# Altium schematic symbol library Altium_Library.SchLib: 822 symbols (part 6 of 17)
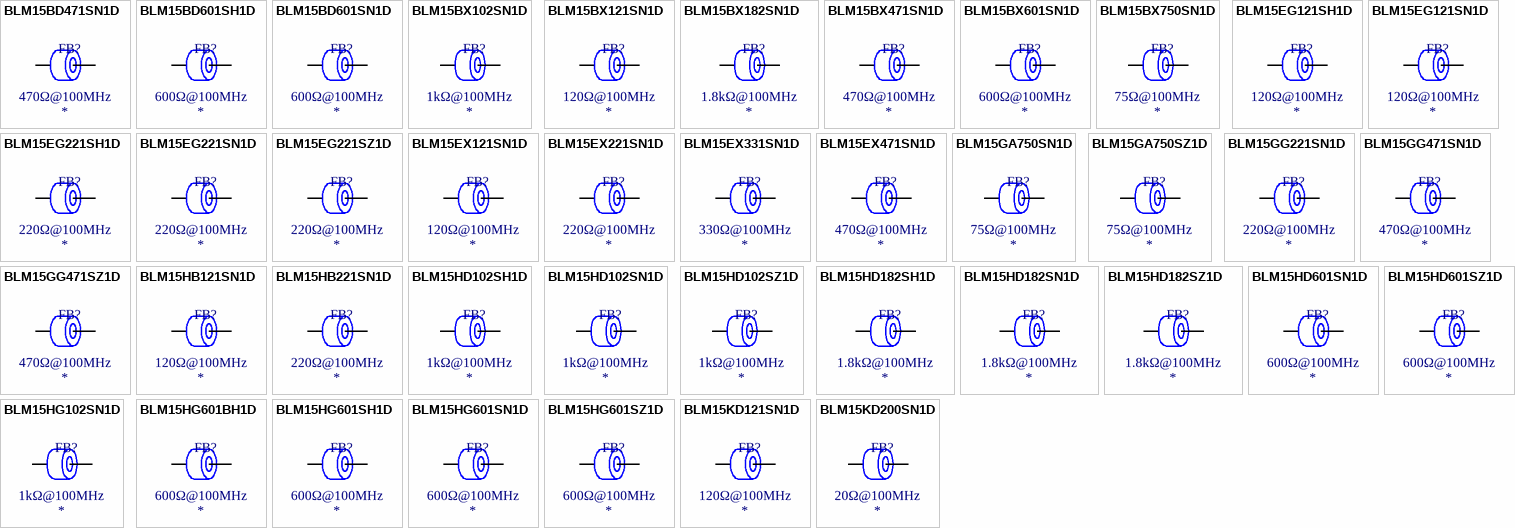
[diagram p25: symbols BLM15BD471SN1D to BLM15KD200SN1D]

## BLM15BX750SN1D
designator FB?  Impedance @ Frequency: 75Ω@100MHz
Ferrite, 75Ω@100MHz, ±25%, 150mΩ, 600mA, SMD 0402; Manufacturer: Murata Electronics; Manufacturer Part Number: BLM15BX750SN1D; Package Size: 0402; JLCPCB Basic Part: No; JLCPCB Part Number: C269770; Supplier 1: LCSC; Category: Ferrite Beads; Supplier Part Number 1: C269770; Tolerance: ±25%; Rated Current: 600mA; DC Resistance: 150mΩ; RoHS: Yes; ComponentLink1Description: Datasheet; ComponentLink1URL: https://wmsc.lcsc.com/wmsc/upload/file/pdf/v2/lcsc/2304140030_Murata-Electronics-BLM15BX750SN1D_C269770.pdf; ComponentLink2Description: JLCPCB Part URL; ComponentLink2URL: https://jlcpcb.com/partdetail/C269770; ComponentLink3Description: LCSC Part URL; ComponentLink3URL: https://lcsc.com/product-detail/Ferrite-Beads_Murata-Electronics-Murata-Electronics-BLM15BX750SN1D_C269770.html
footprint FB-0402 (0402 (1005M) Ferrite)
pins: 1, 2

## BLM15EG121SH1D
designator FB?  Impedance @ Frequency: 120Ω@100MHz
Ferrite, 120Ω@100MHz, ±25%, 95mΩ, 1.5A, SMD 0402; Manufacturer: Murata Electronics; Manufacturer Part Number: BLM15EG121SH1D; Package Size: 0402; JLCPCB Basic Part: No; JLCPCB Part Number: C2661817; Supplier 1: LCSC; Category: Ferrite Beads; Supplier Part Number 1: C2661817; Tolerance: ±25%; Rated Current: 1.5A; DC Resistance: 95mΩ; RoHS: Yes; ComponentLink1Description: Datasheet; ComponentLink1URL: https://wmsc.lcsc.com/wmsc/upload/file/pdf/v2/lcsc/2304140030_Murata-Electronics-BLM15EG121SH1D_C2661817.pdf; ComponentLink2Description: JLCPCB Part URL; ComponentLink2URL: https://jlcpcb.com/partdetail/C2661817; ComponentLink3Description: LCSC Part URL; ComponentLink3URL: https://lcsc.com/product-detail/Ferrite-Beads_Murata-Electronics-Murata-Electronics-BLM15EG121SH1D_C2661817.html
footprint FB-0402 (0402 (1005M) Ferrite)
pins: 1, 2

## BLM15EG121SN1D
designator FB?  Impedance @ Frequency: 120Ω@100MHz
Ferrite, 120Ω@100MHz, ±25%, 95mΩ, 1.5A, SMD 0402; Manufacturer: Murata Electronics; Manufacturer Part Number: BLM15EG121SN1D; Package Size: 0402; JLCPCB Basic Part: No; JLCPCB Part Number: C82861; Supplier 1: LCSC; Category: Ferrite Beads; Supplier Part Number 1: C82861; Tolerance: ±25%; Rated Current: 1.5A; DC Resistance: 95mΩ; RoHS: Yes; ComponentLink1Description: Datasheet; ComponentLink1URL: https://wmsc.lcsc.com/wmsc/upload/file/pdf/v2/lcsc/2304140030_Murata-Electronics-BLM15EG121SN1D_C82861.pdf; ComponentLink2Description: JLCPCB Part URL; ComponentLink2URL: https://jlcpcb.com/partdetail/C82861; ComponentLink3Description: LCSC Part URL; ComponentLink3URL: https://lcsc.com/product-detail/Ferrite-Beads_Murata-Electronics-Murata-Electronics-BLM15EG121SN1D_C82861.html
footprint FB-0402 (0402 (1005M) Ferrite)
pins: 1, 2

## BLM15EG221SH1D
designator FB?  Impedance @ Frequency: 220Ω@100MHz
Ferrite, 220Ω@100MHz, ±25%, 280mΩ, 700mA, SMD 0402; Manufacturer: Murata Electronics; Manufacturer Part Number: BLM15EG221SH1D; Package Size: 0402; JLCPCB Basic Part: No; JLCPCB Part Number: C2662025; Supplier 1: LCSC; Category: Ferrite Beads; Supplier Part Number 1: C2662025; Tolerance: ±25%; Rated Current: 700mA; DC Resistance: 280mΩ; RoHS: Yes; ComponentLink1Description: Datasheet; ComponentLink1URL: https://wmsc.lcsc.com/wmsc/upload/file/pdf/v2/lcsc/2108070930_Murata-Electronics-BLM15EG221SH1D_C2662025.pdf; ComponentLink2Description: JLCPCB Part URL; ComponentLink2URL: https://jlcpcb.com/partdetail/C2662025; ComponentLink3Description: LCSC Part URL; ComponentLink3URL: https://lcsc.com/product-detail/Ferrite-Beads_Murata-Electronics-Murata-Electronics-BLM15EG221SH1D_C2662025.html
footprint FB-0402 (0402 (1005M) Ferrite)
pins: 1, 2

## BLM15EG221SN1D
designator FB?  Impedance @ Frequency: 220Ω@100MHz
Ferrite, 220Ω@100MHz, ±25%, 280mΩ, 700mA, SMD 0402; Manufacturer: Murata Electronics; Manufacturer Part Number: BLM15EG221SN1D; Package Size: 0402; JLCPCB Basic Part: No; JLCPCB Part Number: C85821; Supplier 1: LCSC; Category: Ferrite Beads; Supplier Part Number 1: C85821; Tolerance: ±25%; Rated Current: 700mA; DC Resistance: 280mΩ; RoHS: Yes; ComponentLink1Description: Datasheet; ComponentLink1URL: https://wmsc.lcsc.com/wmsc/upload/file/pdf/v2/lcsc/2304140030_Murata-Electronics-BLM15EG221SN1D_C85821.pdf; ComponentLink2Description: JLCPCB Part URL; ComponentLink2URL: https://jlcpcb.com/partdetail/C85821; ComponentLink3Description: LCSC Part URL; ComponentLink3URL: https://lcsc.com/product-detail/Ferrite-Beads_Murata-Electronics-Murata-Electronics-BLM15EG221SN1D_C85821.html
footprint FB-0402 (0402 (1005M) Ferrite)
pins: 1, 2

## BLM15EG221SZ1D
designator FB?  Impedance @ Frequency: 220Ω@100MHz
Ferrite, 220Ω@100MHz, ±25%, 280mΩ, 700mA, SMD 0402; Manufacturer: Murata Electronics; Manufacturer Part Number: BLM15EG221SZ1D; Package Size: 0402; JLCPCB Basic Part: No; JLCPCB Part Number: C710338; Supplier 1: LCSC; Category: Ferrite Beads; Supplier Part Number 1: C710338; Tolerance: ±25%; Rated Current: 700mA; DC Resistance: 280mΩ; RoHS: Yes; ComponentLink1Description: Datasheet; ComponentLink1URL: https://wmsc.lcsc.com/wmsc/upload/file/pdf/v2/lcsc/2012231244_Murata-Electronics-BLM15EG221SZ1D_C710338.pdf; ComponentLink2Description: JLCPCB Part URL; ComponentLink2URL: https://jlcpcb.com/partdetail/C710338; ComponentLink3Description: LCSC Part URL; ComponentLink3URL: https://lcsc.com/product-detail/Ferrite-Beads_Murata-Electronics-Murata-Electronics-BLM15EG221SZ1D_C710338.html
footprint FB-0402 (0402 (1005M) Ferrite)
pins: 1, 2

## BLM15EX121SN1D
designator FB?  Impedance @ Frequency: 120Ω@100MHz
Ferrite, 120Ω@100MHz, ±25%, 75mΩ, 1.8A, SMD 0402; Manufacturer: Murata Electronics; Manufacturer Part Number: BLM15EX121SN1D; Package Size: 0402; JLCPCB Basic Part: No; JLCPCB Part Number: C426325; Supplier 1: LCSC; Category: Ferrite Beads; Supplier Part Number 1: C426325; Tolerance: ±25%; Rated Current: 1.8A; DC Resistance: 75mΩ; RoHS: Yes; ComponentLink1Description: Datasheet; ComponentLink1URL: https://wmsc.lcsc.com/wmsc/upload/file/pdf/v2/lcsc/2304140030_Murata-Electronics-BLM15EX121SN1D_C426325.pdf; ComponentLink2Description: JLCPCB Part URL; ComponentLink2URL: https://jlcpcb.com/partdetail/C426325; ComponentLink3Description: LCSC Part URL; ComponentLink3URL: https://lcsc.com/product-detail/Ferrite-Beads_Murata-Electronics-Murata-Electronics-BLM15EX121SN1D_C426325.html
footprint FB-0402 (0402 (1005M) Ferrite)
pins: 1, 2

## BLM15EX221SN1D
designator FB?  Impedance @ Frequency: 220Ω@100MHz
Ferrite, 220Ω@100MHz, ±25%, 140mΩ, 1.3A, SMD 0402; Manufacturer: Murata Electronics; Manufacturer Part Number: BLM15EX221SN1D; Package Size: 0402; JLCPCB Basic Part: No; JLCPCB Part Number: C527619; Supplier 1: LCSC; Category: Ferrite Beads; Supplier Part Number 1: C527619; Tolerance: ±25%; Rated Current: 1.3A; DC Resistance: 140mΩ; RoHS: Yes; ComponentLink1Description: Datasheet; ComponentLink1URL: https://wmsc.lcsc.com/wmsc/upload/file/pdf/v2/lcsc/2007231033_Murata-Electronics-BLM15EX221SN1D_C527619.pdf; ComponentLink2Description: JLCPCB Part URL; ComponentLink2URL: https://jlcpcb.com/partdetail/C527619; ComponentLink3Description: LCSC Part URL; ComponentLink3URL: https://lcsc.com/product-detail/Ferrite-Beads_Murata-Electronics-Murata-Electronics-BLM15EX221SN1D_C527619.html
footprint FB-0402 (0402 (1005M) Ferrite)
pins: 1, 2

## BLM15EX331SN1D
designator FB?  Impedance @ Frequency: 330Ω@100MHz
Ferrite, 330Ω@100MHz, 205mΩ, SMD 0402; Manufacturer: Murata Electronics; Manufacturer Part Number: BLM15EX331SN1D; Package Size: 0402; JLCPCB Basic Part: No; JLCPCB Part Number: C596498; Supplier 1: LCSC; Category: Ferrite Beads; Supplier Part Number 1: C596498; DC Resistance: 205mΩ; RoHS: Yes; ComponentLink1Description: Datasheet; ComponentLink1URL: https://wmsc.lcsc.com/wmsc/upload/file/pdf/v2/lcsc/2308111547_Murata-Electronics-BLM15EX331SN1D_C596498.pdf; ComponentLink2Description: JLCPCB Part URL; ComponentLink2URL: https://jlcpcb.com/partdetail/C596498; ComponentLink3Description: LCSC Part URL; ComponentLink3URL: https://lcsc.com/product-detail/Ferrite-Beads_Murata-Electronics-Murata-Electronics-BLM15EX331SN1D_C596498.html
footprint FB-0402 (0402 (1005M) Ferrite)
pins: 1, 2

## BLM15EX471SN1D
designator FB?  Impedance @ Frequency: 470Ω@100MHz
Ferrite, 470Ω@100MHz, ±25%, 280mΩ, 950mA, SMD 0402; Manufacturer: Murata Electronics; Manufacturer Part Number: BLM15EX471SN1D; Package Size: 0402; JLCPCB Basic Part: No; JLCPCB Part Number: C160971; Supplier 1: LCSC; Category: Ferrite Beads; Supplier Part Number 1: C160971; Tolerance: ±25%; Rated Current: 950mA; DC Resistance: 280mΩ; RoHS: Yes; ComponentLink1Description: Datasheet; ComponentLink1URL: https://wmsc.lcsc.com/wmsc/upload/file/pdf/v2/lcsc/1811081543_Murata-Electronics-BLM15EX471SN1D_C160971.pdf; ComponentLink2Description: JLCPCB Part URL; ComponentLink2URL: https://jlcpcb.com/partdetail/C160971; ComponentLink3Description: LCSC Part URL; ComponentLink3URL: https://lcsc.com/product-detail/Ferrite-Beads_Murata-Electronics-Murata-Electronics-BLM15EX471SN1D_C160971.html
footprint FB-0402 (0402 (1005M) Ferrite)
pins: 1, 2

## BLM15GA750SN1D
designator FB?  Impedance @ Frequency: 75Ω@100MHz
Ferrite, 75Ω@100MHz, ±25%, 1.3Ω, 200mA, SMD 0402; Manufacturer: Murata Electronics; Manufacturer Part Number: BLM15GA750SN1D; Package Size: 0402; JLCPCB Basic Part: No; JLCPCB Part Number: C113009; Supplier 1: LCSC; Category: Ferrite Beads; Supplier Part Number 1: C113009; Tolerance: ±25%; Rated Current: 200mA; DC Resistance: 1.3Ω; RoHS: Yes; ComponentLink1Description: Datasheet; ComponentLink1URL: https://wmsc.lcsc.com/wmsc/upload/file/pdf/v2/lcsc/1811081516_Murata-Electronics-BLM15GA750SN1D_C113009.pdf; ComponentLink2Description: JLCPCB Part URL; ComponentLink2URL: https://jlcpcb.com/partdetail/C113009; ComponentLink3Description: LCSC Part URL; ComponentLink3URL: https://lcsc.com/product-detail/Ferrite-Beads_Murata-Electronics-Murata-Electronics-BLM15GA750SN1D_C113009.html
footprint FB-0402 (0402 (1005M) Ferrite)
pins: 1, 2

## BLM15GA750SZ1D
designator FB?  Impedance @ Frequency: 75Ω@100MHz
Ferrite, 75Ω@100MHz, ±25%, 1.3Ω, 200mA, SMD 0402; Manufacturer: Murata Electronics; Manufacturer Part Number: BLM15GA750SZ1D; Package Size: 0402; JLCPCB Basic Part: No; JLCPCB Part Number: C2661966; Supplier 1: LCSC; Category: Ferrite Beads; Supplier Part Number 1: C2661966; Tolerance: ±25%; Rated Current: 200mA; DC Resistance: 1.3Ω; RoHS: Yes; ComponentLink1Description: Datasheet; ComponentLink1URL: https://wmsc.lcsc.com/wmsc/upload/file/pdf/v2/lcsc/2106071735_Murata-Electronics-BLM15GA750SZ1D_C2661966.pdf; ComponentLink2Description: JLCPCB Part URL; ComponentLink2URL: https://jlcpcb.com/partdetail/C2661966; ComponentLink3Description: LCSC Part URL; ComponentLink3URL: https://lcsc.com/product-detail/Ferrite-Beads_Murata-Electronics-Murata-Electronics-BLM15GA750SZ1D_C2661966.html
footprint FB-0402 (0402 (1005M) Ferrite)
pins: 1, 2

## BLM15GG221SN1D
designator FB?  Impedance @ Frequency: 220Ω@100MHz
Ferrite, 220Ω@100MHz, ±25%, 700mΩ, 300mA, SMD 0402; Manufacturer: Murata Electronics; Manufacturer Part Number: BLM15GG221SN1D; Package Size: 0402; JLCPCB Basic Part: No; JLCPCB Part Number: C167448; Supplier 1: LCSC; Category: Ferrite Beads; Supplier Part Number 1: C167448; Tolerance: ±25%; Rated Current: 300mA; DC Resistance: 700mΩ; RoHS: Yes; ComponentLink1Description: Datasheet; ComponentLink1URL: https://wmsc.lcsc.com/wmsc/upload/file/pdf/v2/lcsc/1811081543_Murata-Electronics-BLM15GG221SN1D_C167448.pdf; ComponentLink2Description: JLCPCB Part URL; ComponentLink2URL: https://jlcpcb.com/partdetail/C167448; ComponentLink3Description: LCSC Part URL; ComponentLink3URL: https://lcsc.com/product-detail/Ferrite-Beads_Murata-Electronics-Murata-Electronics-BLM15GG221SN1D_C167448.html
footprint FB-0402 (0402 (1005M) Ferrite)
pins: 1, 2

## BLM15GG471SN1D
designator FB?  Impedance @ Frequency: 470Ω@100MHz
Ferrite, 470Ω@100MHz, ±25%, 1.3Ω, 200mA, SMD 0402; Manufacturer: Murata Electronics; Manufacturer Part Number: BLM15GG471SN1D; Package Size: 0402; JLCPCB Basic Part: No; JLCPCB Part Number: C88964; Supplier 1: LCSC; Category: Ferrite Beads; Supplier Part Number 1: C88964; Tolerance: ±25%; Rated Current: 200mA; DC Resistance: 1.3Ω; RoHS: Yes; ComponentLink1Description: Datasheet; ComponentLink1URL: https://wmsc.lcsc.com/wmsc/upload/file/pdf/v2/lcsc/2304140030_Murata-Electronics-BLM15GG471SN1D_C88964.pdf; ComponentLink2Description: JLCPCB Part URL; ComponentLink2URL: https://jlcpcb.com/partdetail/C88964; ComponentLink3Description: LCSC Part URL; ComponentLink3URL: https://lcsc.com/product-detail/Ferrite-Beads_Murata-Electronics-Murata-Electronics-BLM15GG471SN1D_C88964.html
footprint FB-0402 (0402 (1005M) Ferrite)
pins: 1, 2

## BLM15GG471SZ1D
designator FB?  Impedance @ Frequency: 470Ω@100MHz
Ferrite, 470Ω@100MHz, ±25%, 1.3Ω, 200mA, SMD 0402; Manufacturer: Murata Electronics; Manufacturer Part Number: BLM15GG471SZ1D; Package Size: 0402; JLCPCB Basic Part: No; JLCPCB Part Number: C710339; Supplier 1: LCSC; Category: Ferrite Beads; Supplier Part Number 1: C710339; Tolerance: ±25%; Rated Current: 200mA; DC Resistance: 1.3Ω; RoHS: Yes; ComponentLink1Description: Datasheet; ComponentLink1URL: https://wmsc.lcsc.com/wmsc/upload/file/pdf/v2/lcsc/2304140030_Murata-Electronics-BLM15GG471SZ1D_C710339.pdf; ComponentLink2Description: JLCPCB Part URL; ComponentLink2URL: https://jlcpcb.com/partdetail/C710339; ComponentLink3Description: LCSC Part URL; ComponentLink3URL: https://lcsc.com/product-detail/Ferrite-Beads_Murata-Electronics-Murata-Electronics-BLM15GG471SZ1D_C710339.html
footprint FB-0402 (0402 (1005M) Ferrite)
pins: 1, 2

## BLM15HB121SN1D
designator FB?  Impedance @ Frequency: 120Ω@100MHz
Ferrite, 120Ω@100MHz, ±25%, 700mΩ, 300mA, SMD 0402; Manufacturer: Murata Electronics; Manufacturer Part Number: BLM15HB121SN1D; Package Size: 0402; JLCPCB Basic Part: No; JLCPCB Part Number: C88965; Supplier 1: LCSC; Category: Ferrite Beads; Supplier Part Number 1: C88965; Tolerance: ±25%; Rated Current: 300mA; DC Resistance: 700mΩ; RoHS: Yes; ComponentLink1Description: Datasheet; ComponentLink1URL: https://wmsc.lcsc.com/wmsc/upload/file/pdf/v2/lcsc/2304140030_Murata-Electronics-BLM15HB121SN1D_C88965.pdf; ComponentLink2Description: JLCPCB Part URL; ComponentLink2URL: https://jlcpcb.com/partdetail/C88965; ComponentLink3Description: LCSC Part URL; ComponentLink3URL: https://lcsc.com/product-detail/Ferrite-Beads_Murata-Electronics-Murata-Electronics-BLM15HB121SN1D_C88965.html
footprint FB-0402 (0402 (1005M) Ferrite)
pins: 1, 2

## BLM15HB221SN1D
designator FB?  Impedance @ Frequency: 220Ω@100MHz
Ferrite, 220Ω@100MHz, ±25%, 1Ω, 250mA, SMD 0402; Manufacturer: Murata Electronics; Manufacturer Part Number: BLM15HB221SN1D; Package Size: 0402; JLCPCB Basic Part: No; JLCPCB Part Number: C88966; Supplier 1: LCSC; Category: Ferrite Beads; Supplier Part Number 1: C88966; Tolerance: ±25%; Rated Current: 250mA; DC Resistance: 1Ω; RoHS: Yes; ComponentLink1Description: Datasheet; ComponentLink1URL: https://wmsc.lcsc.com/wmsc/upload/file/pdf/v2/lcsc/2304140030_Murata-Electronics-BLM15HB221SN1D_C88966.pdf; ComponentLink2Description: JLCPCB Part URL; ComponentLink2URL: https://jlcpcb.com/partdetail/C88966; ComponentLink3Description: LCSC Part URL; ComponentLink3URL: https://lcsc.com/product-detail/Ferrite-Beads_Murata-Electronics-Murata-Electronics-BLM15HB221SN1D_C88966.html
footprint FB-0402 (0402 (1005M) Ferrite)
pins: 1, 2

## BLM15HD102SH1D
designator FB?  Impedance @ Frequency: 1kΩ@100MHz
Ferrite, 1kΩ@100MHz, ±25%, 1.25Ω, 250mA, SMD 0402; Manufacturer: Murata Electronics; Manufacturer Part Number: BLM15HD102SH1D; Package Size: 0402; JLCPCB Basic Part: No; JLCPCB Part Number: C440128; Supplier 1: LCSC; Category: Ferrite Beads; Supplier Part Number 1: C440128; Tolerance: ±25%; Rated Current: 250mA; DC Resistance: 1.25Ω; RoHS: Yes; ComponentLink1Description: Datasheet; ComponentLink1URL: https://wmsc.lcsc.com/wmsc/upload/file/pdf/v2/lcsc/2001071206_Murata-Electronics-BLM15HD102SH1D_C440128.pdf; ComponentLink2Description: JLCPCB Part URL; ComponentLink2URL: https://jlcpcb.com/partdetail/C440128; ComponentLink3Description: LCSC Part URL; ComponentLink3URL: https://lcsc.com/product-detail/Ferrite-Beads_Murata-Electronics-Murata-Electronics-BLM15HD102SH1D_C440128.html
footprint FB-0402 (0402 (1005M) Ferrite)
pins: 1, 2

## BLM15HD102SN1D
designator FB?  Impedance @ Frequency: 1kΩ@100MHz
Ferrite, 1kΩ@100MHz, ±25%, 1.25Ω, 250mA, SMD 0402; Manufacturer: Murata Electronics; Manufacturer Part Number: BLM15HD102SN1D; Package Size: 0402; JLCPCB Basic Part: No; JLCPCB Part Number: C21516; Supplier 1: LCSC; Category: Ferrite Beads; Supplier Part Number 1: C21516; Tolerance: ±25%; Rated Current: 250mA; DC Resistance: 1.25Ω; RoHS: Yes; ComponentLink1Description: Datasheet; ComponentLink1URL: https://wmsc.lcsc.com/wmsc/upload/file/pdf/v2/lcsc/1811091923_Murata-Electronics-BLM15HD102SN1D_C21516.pdf; ComponentLink2Description: JLCPCB Part URL; ComponentLink2URL: https://jlcpcb.com/partdetail/C21516; ComponentLink3Description: LCSC Part URL; ComponentLink3URL: https://lcsc.com/product-detail/Ferrite-Beads_Murata-Electronics-Murata-Electronics-BLM15HD102SN1D_C21516.html
footprint FB-0402 (0402 (1005M) Ferrite)
pins: 1, 2

## BLM15HD102SZ1D
designator FB?  Impedance @ Frequency: 1kΩ@100MHz
Ferrite, 1kΩ@100MHz, 1.25Ω, SMD 0402; Manufacturer: Murata Electronics; Manufacturer Part Number: BLM15HD102SZ1D; Package Size: 0402; JLCPCB Basic Part: No; JLCPCB Part Number: C783274; Supplier 1: LCSC; Category: Ferrite Beads; Supplier Part Number 1: C783274; DC Resistance: 1.25Ω; RoHS: Yes; ComponentLink1Description: Datasheet; ComponentLink1URL: https://wmsc.lcsc.com/wmsc/upload/file/pdf/v2/lcsc/2308111547_Murata-Electronics-BLM15HD102SZ1D_C783274.pdf; ComponentLink2Description: JLCPCB Part URL; ComponentLink2URL: https://jlcpcb.com/partdetail/C783274; ComponentLink3Description: LCSC Part URL; ComponentLink3URL: https://lcsc.com/product-detail/Ferrite-Beads_Murata-Electronics-Murata-Electronics-BLM15HD102SZ1D_C783274.html
footprint FB-0402 (0402 (1005M) Ferrite)
pins: 1, 2

## BLM15HD182SH1D
designator FB?  Impedance @ Frequency: 1.8kΩ@100MHz
Ferrite, 1.8kΩ@100MHz, ±25%, 2.2Ω, 200mA, SMD 0402; Manufacturer: Murata Electronics; Manufacturer Part Number: BLM15HD182SH1D; Package Size: 0402; JLCPCB Basic Part: No; JLCPCB Part Number: C337876; Supplier 1: LCSC; Category: Ferrite Beads; Supplier Part Number 1: C337876; Tolerance: ±25%; Rated Current: 200mA; DC Resistance: 2.2Ω; RoHS: Yes; ComponentLink1Description: Datasheet; ComponentLink1URL: https://wmsc.lcsc.com/wmsc/upload/file/pdf/v2/lcsc/2304140030_Murata-Electronics-BLM15HD182SH1D_C337876.pdf; ComponentLink2Description: JLCPCB Part URL; ComponentLink2URL: https://jlcpcb.com/partdetail/C337876; ComponentLink3Description: LCSC Part URL; ComponentLink3URL: https://lcsc.com/product-detail/Ferrite-Beads_Murata-Electronics-Murata-Electronics-BLM15HD182SH1D_C337876.html
footprint FB-0402 (0402 (1005M) Ferrite)
pins: 1, 2

## BLM15HD182SN1D
designator FB?  Impedance @ Frequency: 1.8kΩ@100MHz
Ferrite, 1.8kΩ@100MHz, ±25%, 2.2Ω, 200mA, SMD 0402; Manufacturer: Murata Electronics; Manufacturer Part Number: BLM15HD182SN1D; Package Size: 0402; JLCPCB Basic Part: No; JLCPCB Part Number: C76888; Supplier 1: LCSC; Category: Ferrite Beads; Supplier Part Number 1: C76888; Tolerance: ±25%; Rated Current: 200mA; DC Resistance: 2.2Ω; RoHS: Yes; ComponentLink1Description: Datasheet; ComponentLink1URL: https://wmsc.lcsc.com/wmsc/upload/file/pdf/v2/lcsc/2304140030_Murata-Electronics-BLM15HD182SN1D_C76888.pdf; ComponentLink2Description: JLCPCB Part URL; ComponentLink2URL: https://jlcpcb.com/partdetail/C76888; ComponentLink3Description: LCSC Part URL; ComponentLink3URL: https://lcsc.com/product-detail/Ferrite-Beads_Murata-Electronics-Murata-Electronics-BLM15HD182SN1D_C76888.html
footprint FB-0402 (0402 (1005M) Ferrite)
pins: 1, 2

## BLM15HD182SZ1D
designator FB?  Impedance @ Frequency: 1.8kΩ@100MHz
Ferrite, 1.8kΩ@100MHz, ±25%, 2.2Ω, 200mA, SMD 0402; Manufacturer: Murata Electronics; Manufacturer Part Number: BLM15HD182SZ1D; Package Size: 0402; JLCPCB Basic Part: No; JLCPCB Part Number: C2661581; Supplier 1: LCSC; Category: Ferrite Beads; Supplier Part Number 1: C2661581; Tolerance: ±25%; Rated Current: 200mA; DC Resistance: 2.2Ω; RoHS: Yes; ComponentLink1Description: Datasheet; ComponentLink1URL: https://wmsc.lcsc.com/wmsc/upload/file/pdf/v2/lcsc/2202131730_Murata-Electronics-BLM15HD182SZ1D_C2661581.pdf; ComponentLink2Description: JLCPCB Part URL; ComponentLink2URL: https://jlcpcb.com/partdetail/C2661581; ComponentLink3Description: LCSC Part URL; ComponentLink3URL: https://lcsc.com/product-detail/Ferrite-Beads_Murata-Electronics-Murata-Electronics-BLM15HD182SZ1D_C2661581.html
footprint FB-0402 (0402 (1005M) Ferrite)
pins: 1, 2

## BLM15HD601SN1D
designator FB?  Impedance @ Frequency: 600Ω@100MHz
Ferrite, 600Ω@100MHz, ±25%, 850mΩ, 300mA, SMD 0402; Manufacturer: Murata Electronics; Manufacturer Part Number: BLM15HD601SN1D; Package Size: 0402; JLCPCB Basic Part: No; JLCPCB Part Number: C88967; Supplier 1: LCSC; Category: Ferrite Beads; Supplier Part Number 1: C88967; Tolerance: ±25%; Rated Current: 300mA; DC Resistance: 850mΩ; RoHS: Yes; ComponentLink1Description: Datasheet; ComponentLink1URL: https://wmsc.lcsc.com/wmsc/upload/file/pdf/v2/lcsc/2304140030_Murata-Electronics-BLM15HD601SN1D_C88967.pdf; ComponentLink2Description: JLCPCB Part URL; ComponentLink2URL: https://jlcpcb.com/partdetail/C88967; ComponentLink3Description: LCSC Part URL; ComponentLink3URL: https://lcsc.com/product-detail/Ferrite-Beads_Murata-Electronics-Murata-Electronics-BLM15HD601SN1D_C88967.html
footprint FB-0402 (0402 (1005M) Ferrite)
pins: 1, 2

## BLM15HD601SZ1D
designator FB?  Impedance @ Frequency: 600Ω@100MHz
Ferrite, 600Ω@100MHz, ±25%, 850mΩ, 300mA, SMD 0402; Manufacturer: Murata Electronics; Manufacturer Part Number: BLM15HD601SZ1D; Package Size: 0402; JLCPCB Basic Part: No; JLCPCB Part Number: C710340; Supplier 1: LCSC; Category: Ferrite Beads; Supplier Part Number 1: C710340; Tolerance: ±25%; Rated Current: 300mA; DC Resistance: 850mΩ; RoHS: Yes; ComponentLink1Description: Datasheet; ComponentLink1URL: https://wmsc.lcsc.com/wmsc/upload/file/pdf/v2/lcsc/2201131100_Murata-Electronics-BLM15HD601SZ1D_C710340.pdf; ComponentLink2Description: JLCPCB Part URL; ComponentLink2URL: https://jlcpcb.com/partdetail/C710340; ComponentLink3Description: LCSC Part URL; ComponentLink3URL: https://lcsc.com/product-detail/Ferrite-Beads_Murata-Electronics-Murata-Electronics-BLM15HD601SZ1D_C710340.html
footprint FB-0402 (0402 (1005M) Ferrite)
pins: 1, 2

## BLM15HG102SN1D
designator FB?  Impedance @ Frequency: 1kΩ@100MHz
Ferrite, 1kΩ@100MHz, ±25%, 1.1Ω, 250mA, SMD 0402; Manufacturer: Murata Electronics; Manufacturer Part Number: BLM15HG102SN1D; Package Size: 0402; JLCPCB Basic Part: No; JLCPCB Part Number: C76889; Supplier 1: LCSC; Category: Ferrite Beads; Supplier Part Number 1: C76889; Tolerance: ±25%; Rated Current: 250mA; DC Resistance: 1.1Ω; RoHS: Yes; ComponentLink1Description: Datasheet; ComponentLink1URL: https://wmsc.lcsc.com/wmsc/upload/file/pdf/v2/lcsc/2304140030_Murata-Electronics-BLM15HG102SN1D_C76889.pdf; ComponentLink2Description: JLCPCB Part URL; ComponentLink2URL: https://jlcpcb.com/partdetail/C76889; ComponentLink3Description: LCSC Part URL; ComponentLink3URL: https://lcsc.com/product-detail/Ferrite-Beads_Murata-Electronics-Murata-Electronics-BLM15HG102SN1D_C76889.html
footprint FB-0402 (0402 (1005M) Ferrite)
pins: 1, 2

## BLM15HG601BH1D
designator FB?  Impedance @ Frequency: 600Ω@100MHz
Ferrite, 600Ω@100MHz, ±25%, 700mΩ, 300mA, SMD 0402; Manufacturer: Murata Electronics; Manufacturer Part Number: BLM15HG601BH1D; Package Size: 0402; JLCPCB Basic Part: No; JLCPCB Part Number: C710342; Supplier 1: LCSC; Category: Ferrite Beads; Supplier Part Number 1: C710342; Tolerance: ±25%; Rated Current: 300mA; DC Resistance: 700mΩ; RoHS: Yes; ComponentLink1Description: Datasheet; ComponentLink1URL: https://wmsc.lcsc.com/wmsc/upload/file/pdf/v2/lcsc/2201131100_Murata-Electronics-BLM15HG601BH1D_C710342.pdf; ComponentLink2Description: JLCPCB Part URL; ComponentLink2URL: https://jlcpcb.com/partdetail/C710342; ComponentLink3Description: LCSC Part URL; ComponentLink3URL: https://lcsc.com/product-detail/Ferrite-Beads_Murata-Electronics-Murata-Electronics-BLM15HG601BH1D_C710342.html
footprint FB-0402 (0402 (1005M) Ferrite)
pins: 1, 2

## BLM15HG601SH1D
designator FB?  Impedance @ Frequency: 600Ω@100MHz
Ferrite, 600Ω@100MHz, ±25%, 700mΩ, 300mA, SMD 0402; Manufacturer: Murata Electronics; Manufacturer Part Number: BLM15HG601SH1D; Package Size: 0402; JLCPCB Basic Part: No; JLCPCB Part Number: C2661959; Supplier 1: LCSC; Category: Ferrite Beads; Supplier Part Number 1: C2661959; Tolerance: ±25%; Rated Current: 300mA; DC Resistance: 700mΩ; RoHS: Yes; ComponentLink1Description: Datasheet; ComponentLink1URL: https://wmsc.lcsc.com/wmsc/upload/file/pdf/v2/lcsc/2106071735_Murata-Electronics-BLM15HG601SH1D_C2661959.pdf; ComponentLink2Description: JLCPCB Part URL; ComponentLink2URL: https://jlcpcb.com/partdetail/C2661959; ComponentLink3Description: LCSC Part URL; ComponentLink3URL: https://lcsc.com/product-detail/Ferrite-Beads_Murata-Electronics-Murata-Electronics-BLM15HG601SH1D_C2661959.html
footprint FB-0402 (0402 (1005M) Ferrite)
pins: 1, 2

## BLM15HG601SN1D
designator FB?  Impedance @ Frequency: 600Ω@100MHz
Ferrite, 600Ω@100MHz, ±25%, 700mΩ, 300mA, SMD 0402; Manufacturer: Murata Electronics; Manufacturer Part Number: BLM15HG601SN1D; Package Size: 0402; JLCPCB Basic Part: No; JLCPCB Part Number: C76890; Supplier 1: LCSC; Category: Ferrite Beads; Supplier Part Number 1: C76890; Tolerance: ±25%; Rated Current: 300mA; DC Resistance: 700mΩ; RoHS: Yes; ComponentLink1Description: Datasheet; ComponentLink1URL: https://wmsc.lcsc.com/wmsc/upload/file/pdf/v2/lcsc/2304140030_Murata-Electronics-BLM15HG601SN1D_C76890.pdf; ComponentLink2Description: JLCPCB Part URL; ComponentLink2URL: https://jlcpcb.com/partdetail/C76890; ComponentLink3Description: LCSC Part URL; ComponentLink3URL: https://lcsc.com/product-detail/Ferrite-Beads_Murata-Electronics-Murata-Electronics-BLM15HG601SN1D_C76890.html
footprint FB-0402 (0402 (1005M) Ferrite)
pins: 1, 2

## BLM15HG601SZ1D
designator FB?  Impedance @ Frequency: 600Ω@100MHz
Ferrite, 600Ω@100MHz, 700mΩ, SMD 0402; Manufacturer: Murata Electronics; Manufacturer Part Number: BLM15HG601SZ1D; Package Size: 0402; JLCPCB Basic Part: No; JLCPCB Part Number: C723884; Supplier 1: LCSC; Category: Ferrite Beads; Supplier Part Number 1: C723884; DC Resistance: 700mΩ; RoHS: Yes; ComponentLink1Description: Datasheet; ComponentLink1URL: https://wmsc.lcsc.com/wmsc/upload/file/pdf/v2/lcsc/2304140030_Murata-Electronics-BLM15HG601SZ1D_C723884.pdf; ComponentLink2Description: JLCPCB Part URL; ComponentLink2URL: https://jlcpcb.com/partdetail/C723884; ComponentLink3Description: LCSC Part URL; ComponentLink3URL: https://lcsc.com/product-detail/Ferrite-Beads_Murata-Electronics-Murata-Electronics-BLM15HG601SZ1D_C723884.html
footprint FB-0402 (0402 (1005M) Ferrite)
pins: 1, 2

## BLM15KD121SN1D
designator FB?  Impedance @ Frequency: 120Ω@100MHz
Ferrite, 120Ω@100MHz, ±25%, 70mΩ, 1.5A, SMD 0402; Manufacturer: Murata Electronics; Manufacturer Part Number: BLM15KD121SN1D; Package Size: 0402; JLCPCB Basic Part: No; JLCPCB Part Number: C710343; Supplier 1: LCSC; Category: Ferrite Beads; Supplier Part Number 1: C710343; Tolerance: ±25%; Rated Current: 1.5A; DC Resistance: 70mΩ; RoHS: Yes; ComponentLink1Description: Datasheet; ComponentLink1URL: https://wmsc.lcsc.com/wmsc/upload/file/pdf/v2/lcsc/2304140030_Murata-Electronics-BLM15KD121SN1D_C710343.pdf; ComponentLink2Description: JLCPCB Part URL; ComponentLink2URL: https://jlcpcb.com/partdetail/C710343; ComponentLink3Description: LCSC Part URL; ComponentLink3URL: https://lcsc.com/product-detail/Ferrite-Beads_Murata-Electronics-Murata-Electronics-BLM15KD121SN1D_C710343.html
footprint FB-0402 (0402 (1005M) Ferrite)
pins: 1, 2

## BLM15KD200SN1D
designator FB?  Impedance @ Frequency: 20Ω@100MHz
Ferrite, 20Ω@100MHz, ±25%, 11mΩ, 3.8A, SMD 0402; Manufacturer: Murata Electronics; Manufacturer Part Number: BLM15KD200SN1D; Package Size: 0402; JLCPCB Basic Part: No; JLCPCB Part Number: C701260; Supplier 1: LCSC; Category: Ferrite Beads; Supplier Part Number 1: C701260; Tolerance: ±25%; Rated Current: 3.8A; DC Resistance: 11mΩ; RoHS: Yes; ComponentLink1Description: Datasheet; ComponentLink1URL: https://wmsc.lcsc.com/wmsc/upload/file/pdf/v2/lcsc/2304140030_Murata-Electronics-BLM15KD200SN1D_C701260.pdf; ComponentLink2Description: JLCPCB Part URL; ComponentLink2URL: https://jlcpcb.com/partdetail/C701260; ComponentLink3Description: LCSC Part URL; ComponentLink3URL: https://lcsc.com/product-detail/Ferrite-Beads_Murata-Electronics-Murata-Electronics-BLM15KD200SN1D_C701260.html
footprint FB-0402 (0402 (1005M) Ferrite)
pins: 1, 2

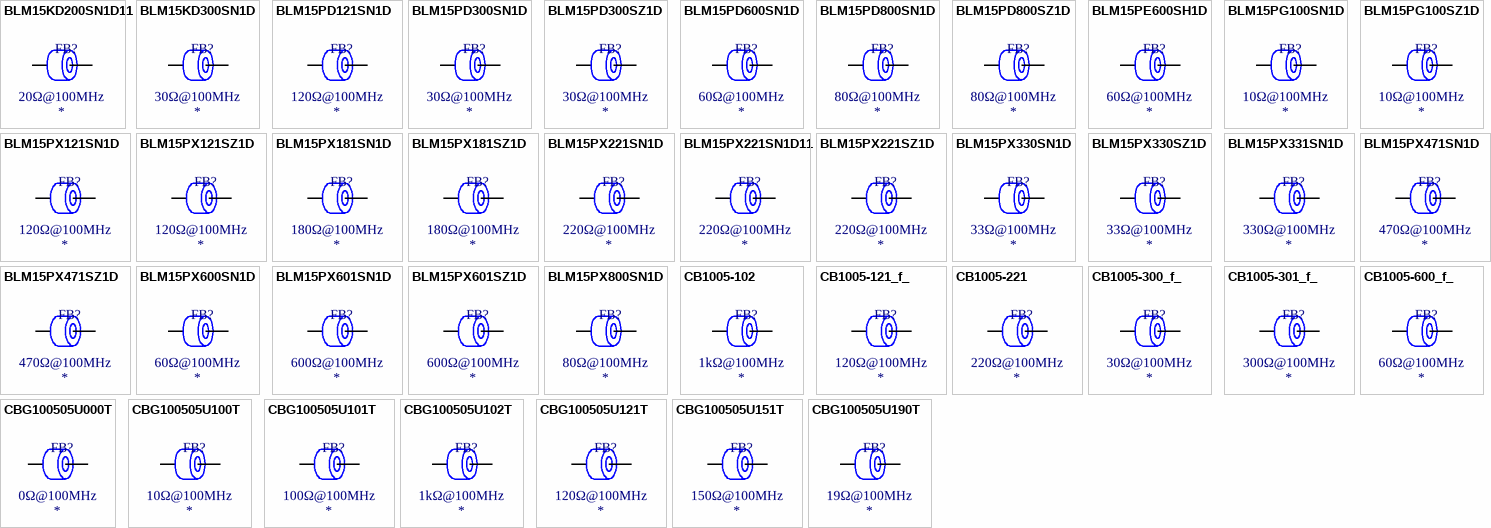
[diagram p8: symbols BLM15KD200SN1D11 to CBG100505U190T]

## BLM15KD200SN1D11
designator FB?  Impedance @ Frequency: 20Ω@100MHz
Ferrite, 20Ω@100MHz, ±25%, 11mΩ, 3.8A, SMD 0402; Manufacturer: Murata Electronics; Manufacturer Part Number: BLM15KD200SN1D11; Package Size: 0402; JLCPCB Basic Part: No; JLCPCB Part Number: C560062; Supplier 1: LCSC; Category: Ferrite Beads; Supplier Part Number 1: C560062; Tolerance: ±25%; Rated Current: 3.8A; DC Resistance: 11mΩ; RoHS: Yes; ComponentLink1Description: Datasheet; ComponentLink1URL: https://wmsc.lcsc.com/wmsc/upload/file/pdf/v2/lcsc/2304140030_Murata-Electronics-BLM15KD200SN1D11_C560062.pdf; ComponentLink2Description: JLCPCB Part URL; ComponentLink2URL: https://jlcpcb.com/partdetail/C560062; ComponentLink3Description: LCSC Part URL; ComponentLink3URL: https://lcsc.com/product-detail/Ferrite-Beads_Murata-Electronics-Murata-Electronics-BLM15KD200SN1D11_C560062.html
footprint FB-0402 (0402 (1005M) Ferrite)
pins: 1, 2

## BLM15KD300SN1D
designator FB?  Impedance @ Frequency: 30Ω@100MHz
Ferrite, 30Ω@100MHz, ±25%, 17mΩ, 3.1A, SMD 0402; Manufacturer: Murata Electronics; Manufacturer Part Number: BLM15KD300SN1D; Package Size: 0402; JLCPCB Basic Part: No; JLCPCB Part Number: C710344; Supplier 1: LCSC; Category: Ferrite Beads; Supplier Part Number 1: C710344; Tolerance: ±25%; Rated Current: 3.1A; DC Resistance: 17mΩ; RoHS: Yes; ComponentLink1Description: Datasheet; ComponentLink1URL: https://wmsc.lcsc.com/wmsc/upload/file/pdf/v2/lcsc/2304140030_Murata-Electronics-BLM15KD300SN1D_C710344.pdf; ComponentLink2Description: JLCPCB Part URL; ComponentLink2URL: https://jlcpcb.com/partdetail/C710344; ComponentLink3Description: LCSC Part URL; ComponentLink3URL: https://lcsc.com/product-detail/Ferrite-Beads_Murata-Electronics-Murata-Electronics-BLM15KD300SN1D_C710344.html
footprint FB-0402 (0402 (1005M) Ferrite)
pins: 1, 2

## BLM15PD121SN1D
designator FB?  Impedance @ Frequency: 120Ω@100MHz
Ferrite, 120Ω@100MHz, ±25%, 90mΩ, 1.3A, SMD 0402; Manufacturer: Murata Electronics; Manufacturer Part Number: BLM15PD121SN1D; Package Size: 0402; JLCPCB Basic Part: No; JLCPCB Part Number: C76891; Supplier 1: LCSC; Category: Ferrite Beads; Supplier Part Number 1: C76891; Tolerance: ±25%; Rated Current: 1.3A; DC Resistance: 90mΩ; RoHS: Yes; ComponentLink1Description: Datasheet; ComponentLink1URL: https://wmsc.lcsc.com/wmsc/upload/file/pdf/v2/lcsc/2304140030_Murata-Electronics-BLM15PD121SN1D_C76891.pdf; ComponentLink2Description: JLCPCB Part URL; ComponentLink2URL: https://jlcpcb.com/partdetail/C76891; ComponentLink3Description: LCSC Part URL; ComponentLink3URL: https://lcsc.com/product-detail/Ferrite-Beads_Murata-Electronics-Murata-Electronics-BLM15PD121SN1D_C76891.html
footprint FB-0402 (0402 (1005M) Ferrite)
pins: 1, 2

## BLM15PD300SN1D
designator FB?  Impedance @ Frequency: 30Ω@100MHz
Ferrite, 30Ω@100MHz, ±25%, 35mΩ, 2.2A, SMD 0402; Manufacturer: Murata Electronics; Manufacturer Part Number: BLM15PD300SN1D; Package Size: 0402; JLCPCB Basic Part: No; JLCPCB Part Number: C85822; Supplier 1: LCSC; Category: Ferrite Beads; Supplier Part Number 1: C85822; Tolerance: ±25%; Rated Current: 2.2A; DC Resistance: 35mΩ; RoHS: Yes; ComponentLink1Description: Datasheet; ComponentLink1URL: https://wmsc.lcsc.com/wmsc/upload/file/pdf/v2/lcsc/2304140030_Murata-Electronics-BLM15PD300SN1D_C85822.pdf; ComponentLink2Description: JLCPCB Part URL; ComponentLink2URL: https://jlcpcb.com/partdetail/C85822; ComponentLink3Description: LCSC Part URL; ComponentLink3URL: https://lcsc.com/product-detail/Ferrite-Beads_Murata-Electronics-Murata-Electronics-BLM15PD300SN1D_C85822.html
footprint FB-0402 (0402 (1005M) Ferrite)
pins: 1, 2

## BLM15PD300SZ1D
designator FB?  Impedance @ Frequency: 30Ω@100MHz
Ferrite, 30Ω@100MHz, ±25%, 35mΩ, 2.2A, SMD 0402; Manufacturer: Murata Electronics; Manufacturer Part Number: BLM15PD300SZ1D; Package Size: 0402; JLCPCB Basic Part: No; JLCPCB Part Number: C882960; Supplier 1: LCSC; Category: Ferrite Beads; Supplier Part Number 1: C882960; Tolerance: ±25%; Rated Current: 2.2A; DC Resistance: 35mΩ; RoHS: Yes; ComponentLink1Description: Datasheet; ComponentLink1URL: https://wmsc.lcsc.com/wmsc/upload/file/pdf/v2/lcsc/2201242130_Murata-Electronics-BLM15PD300SZ1D_C882960.pdf; ComponentLink2Description: JLCPCB Part URL; ComponentLink2URL: https://jlcpcb.com/partdetail/C882960; ComponentLink3Description: LCSC Part URL; ComponentLink3URL: https://lcsc.com/product-detail/Ferrite-Beads_Murata-Electronics-Murata-Electronics-BLM15PD300SZ1D_C882960.html
footprint FB-0402 (0402 (1005M) Ferrite)
pins: 1, 2

## BLM15PD600SN1D
designator FB?  Impedance @ Frequency: 60Ω@100MHz
Ferrite, 60Ω@100MHz, ±25%, 60mΩ, 1.7A, SMD 0402; Manufacturer: Murata Electronics; Manufacturer Part Number: BLM15PD600SN1D; Package Size: 0402; JLCPCB Basic Part: No; JLCPCB Part Number: C88969; Supplier 1: LCSC; Category: Ferrite Beads; Supplier Part Number 1: C88969; Tolerance: ±25%; Rated Current: 1.7A; DC Resistance: 60mΩ; RoHS: Yes; ComponentLink1Description: Datasheet; ComponentLink1URL: https://wmsc.lcsc.com/wmsc/upload/file/pdf/v2/lcsc/2304140030_Murata-Electronics-BLM15PD600SN1D_C88969.pdf; ComponentLink2Description: JLCPCB Part URL; ComponentLink2URL: https://jlcpcb.com/partdetail/C88969; ComponentLink3Description: LCSC Part URL; ComponentLink3URL: https://lcsc.com/product-detail/Ferrite-Beads_Murata-Electronics-Murata-Electronics-BLM15PD600SN1D_C88969.html
footprint FB-0402 (0402 (1005M) Ferrite)
pins: 1, 2

## BLM15PD800SN1D
designator FB?  Impedance @ Frequency: 80Ω@100MHz
Ferrite, 80Ω@100MHz, ±25%, 70mΩ, 1.5A, SMD 0402; Manufacturer: Murata Electronics; Manufacturer Part Number: BLM15PD800SN1D; Package Size: 0402; JLCPCB Basic Part: No; JLCPCB Part Number: C237347; Supplier 1: LCSC; Category: Ferrite Beads; Supplier Part Number 1: C237347; Tolerance: ±25%; Rated Current: 1.5A; DC Resistance: 70mΩ; RoHS: Yes; ComponentLink1Description: Datasheet; ComponentLink1URL: https://wmsc.lcsc.com/wmsc/upload/file/pdf/v2/lcsc/2304140030_Murata-Electronics-BLM15PD800SN1D_C237347.pdf; ComponentLink2Description: JLCPCB Part URL; ComponentLink2URL: https://jlcpcb.com/partdetail/C237347; ComponentLink3Description: LCSC Part URL; ComponentLink3URL: https://lcsc.com/product-detail/Ferrite-Beads_Murata-Electronics-Murata-Electronics-BLM15PD800SN1D_C237347.html
footprint FB-0402 (0402 (1005M) Ferrite)
pins: 1, 2

## BLM15PD800SZ1D
designator FB?  Impedance @ Frequency: 80Ω@100MHz
Ferrite, 80Ω@100MHz, ±25%, 70mΩ, 1.5A, SMD 0402; Manufacturer: Murata Electronics; Manufacturer Part Number: BLM15PD800SZ1D; Package Size: 0402; JLCPCB Basic Part: No; JLCPCB Part Number: C160972; Supplier 1: LCSC; Category: Ferrite Beads; Supplier Part Number 1: C160972; Tolerance: ±25%; Rated Current: 1.5A; DC Resistance: 70mΩ; RoHS: Yes; ComponentLink1Description: Datasheet; ComponentLink1URL: https://wmsc.lcsc.com/wmsc/upload/file/pdf/v2/lcsc/1811081513_Murata-Electronics-BLM15PD800SZ1D_C160972.pdf; ComponentLink2Description: JLCPCB Part URL; ComponentLink2URL: https://jlcpcb.com/partdetail/C160972; ComponentLink3Description: LCSC Part URL; ComponentLink3URL: https://lcsc.com/product-detail/Ferrite-Beads_Murata-Electronics-Murata-Electronics-BLM15PD800SZ1D_C160972.html
footprint FB-0402 (0402 (1005M) Ferrite)
pins: 1, 2

## BLM15PE600SH1D
designator FB?  Impedance @ Frequency: 60Ω@100MHz
Ferrite, 60Ω@100MHz, 60mΩ, SMD 0402; Manufacturer: Murata Electronics; Manufacturer Part Number: BLM15PE600SH1D; Package Size: 0402; JLCPCB Basic Part: No; JLCPCB Part Number: C3716993; Supplier 1: LCSC; Category: Ferrite Beads; Supplier Part Number 1: C3716993; DC Resistance: 60mΩ; RoHS: Yes; ComponentLink1Description: Datasheet; ComponentLink1URL: https://wmsc.lcsc.com/wmsc/upload/file/pdf/v2/lcsc/2401161242_Murata-Electronics-BLM15PE600SH1D_C3716993.pdf; ComponentLink2Description: JLCPCB Part URL; ComponentLink2URL: https://jlcpcb.com/partdetail/C3716993; ComponentLink3Description: LCSC Part URL; ComponentLink3URL: https://lcsc.com/product-detail/Ferrite-Beads_Murata-Electronics-Murata-Electronics-BLM15PE600SH1D_C3716993.html
footprint FB-0402 (0402 (1005M) Ferrite)
pins: 1, 2

## BLM15PG100SN1D
designator FB?  Impedance @ Frequency: 10Ω@100MHz
Ferrite, 10Ω@100MHz, ±25%, 25mΩ, 1A, SMD 0402; Manufacturer: Murata Electronics; Manufacturer Part Number: BLM15PG100SN1D; Package Size: 0402; JLCPCB Basic Part: No; JLCPCB Part Number: C85823; Supplier 1: LCSC; Category: Ferrite Beads; Supplier Part Number 1: C85823; Tolerance: ±25%; Rated Current: 1A; DC Resistance: 25mΩ; RoHS: Yes; ComponentLink1Description: Datasheet; ComponentLink1URL: https://wmsc.lcsc.com/wmsc/upload/file/pdf/v2/lcsc/2304140030_Murata-Electronics-BLM15PG100SN1D_C85823.pdf; ComponentLink2Description: JLCPCB Part URL; ComponentLink2URL: https://jlcpcb.com/partdetail/C85823; ComponentLink3Description: LCSC Part URL; ComponentLink3URL: https://lcsc.com/product-detail/Ferrite-Beads_Murata-Electronics-Murata-Electronics-BLM15PG100SN1D_C85823.html
footprint FB-0402 (0402 (1005M) Ferrite)
pins: 1, 2

## BLM15PG100SZ1D
designator FB?  Impedance @ Frequency: 10Ω@100MHz
Ferrite, 10Ω@100MHz, ±25%, 250mΩ, 1A, SMD 0402; Manufacturer: Murata Electronics; Manufacturer Part Number: BLM15PG100SZ1D; Package Size: 0402; JLCPCB Basic Part: No; JLCPCB Part Number: C2661915; Supplier 1: LCSC; Category: Ferrite Beads; Supplier Part Number 1: C2661915; Tolerance: ±25%; Rated Current: 1A; DC Resistance: 250mΩ; RoHS: Yes; ComponentLink1Description: Datasheet; ComponentLink1URL: https://wmsc.lcsc.com/wmsc/upload/file/pdf/v2/lcsc/2304140030_Murata-Electronics-BLM15PG100SZ1D_C2661915.pdf; ComponentLink2Description: JLCPCB Part URL; ComponentLink2URL: https://jlcpcb.com/partdetail/C2661915; ComponentLink3Description: LCSC Part URL; ComponentLink3URL: https://lcsc.com/product-detail/Ferrite-Beads_Murata-Electronics-Murata-Electronics-BLM15PG100SZ1D_C2661915.html
footprint FB-0402 (0402 (1005M) Ferrite)
pins: 1, 2

## BLM15PX121SN1D
designator FB?  Impedance @ Frequency: 120Ω@100MHz
Ferrite, 120Ω@100MHz, ±25%, 55mΩ, 2A, SMD 0402; Manufacturer: Murata Electronics; Manufacturer Part Number: BLM15PX121SN1D; Package Size: 0402; JLCPCB Basic Part: No; JLCPCB Part Number: C88970; Supplier 1: LCSC; Category: Ferrite Beads; Supplier Part Number 1: C88970; Tolerance: ±25%; Rated Current: 2A; DC Resistance: 55mΩ; RoHS: Yes; ComponentLink1Description: Datasheet; ComponentLink1URL: https://wmsc.lcsc.com/wmsc/upload/file/pdf/v2/lcsc/2304140030_Murata-Electronics-BLM15PX121SN1D_C88970.pdf; ComponentLink2Description: JLCPCB Part URL; ComponentLink2URL: https://jlcpcb.com/partdetail/C88970; ComponentLink3Description: LCSC Part URL; ComponentLink3URL: https://lcsc.com/product-detail/Ferrite-Beads_Murata-Electronics-Murata-Electronics-BLM15PX121SN1D_C88970.html
footprint FB-0402 (0402 (1005M) Ferrite)
pins: 1, 2

## BLM15PX121SZ1D
designator FB?  Impedance @ Frequency: 120Ω@100MHz
Ferrite, 120Ω@100MHz, ±25%, 55mΩ, 2A, SMD 0402; Manufacturer: Murata Electronics; Manufacturer Part Number: BLM15PX121SZ1D; Package Size: 0402; JLCPCB Basic Part: No; JLCPCB Part Number: C701266; Supplier 1: LCSC; Category: Ferrite Beads; Supplier Part Number 1: C701266; Tolerance: ±25%; Rated Current: 2A; DC Resistance: 55mΩ; RoHS: Yes; ComponentLink1Description: Datasheet; ComponentLink1URL: https://wmsc.lcsc.com/wmsc/upload/file/pdf/v2/lcsc/2304140030_Murata-Electronics-BLM15PX121SZ1D_C701266.pdf; ComponentLink2Description: JLCPCB Part URL; ComponentLink2URL: https://jlcpcb.com/partdetail/C701266; ComponentLink3Description: LCSC Part URL; ComponentLink3URL: https://lcsc.com/product-detail/Ferrite-Beads_Murata-Electronics-Murata-Electronics-BLM15PX121SZ1D_C701266.html
footprint FB-0402 (0402 (1005M) Ferrite)
pins: 1, 2

## BLM15PX181SN1D
designator FB?  Impedance @ Frequency: 180Ω@100MHz
Ferrite, 180Ω@100MHz, ±25%, 90mΩ, 1.5A, SMD 0402; Manufacturer: Murata Electronics; Manufacturer Part Number: BLM15PX181SN1D; Package Size: 0402; JLCPCB Basic Part: No; JLCPCB Part Number: C237601; Supplier 1: LCSC; Category: Ferrite Beads; Supplier Part Number 1: C237601; Tolerance: ±25%; Rated Current: 1.5A; DC Resistance: 90mΩ; RoHS: Yes; ComponentLink1Description: Datasheet; ComponentLink1URL: https://wmsc.lcsc.com/wmsc/upload/file/pdf/v2/lcsc/2304140030_Murata-Electronics-BLM15PX181SN1D_C237601.pdf; ComponentLink2Description: JLCPCB Part URL; ComponentLink2URL: https://jlcpcb.com/partdetail/C237601; ComponentLink3Description: LCSC Part URL; ComponentLink3URL: https://lcsc.com/product-detail/Ferrite-Beads_Murata-Electronics-Murata-Electronics-BLM15PX181SN1D_C237601.html
footprint FB-0402 (0402 (1005M) Ferrite)
pins: 1, 2

## BLM15PX181SZ1D
designator FB?  Impedance @ Frequency: 180Ω@100MHz
Ferrite, 180Ω@100MHz, 90mΩ, 1.5A, SMD 0402; Manufacturer: Murata Electronics; Manufacturer Part Number: BLM15PX181SZ1D; Package Size: 0402; JLCPCB Basic Part: No; JLCPCB Part Number: C560034; Supplier 1: LCSC; Category: Ferrite Beads; Supplier Part Number 1: C560034; Rated Current: 1.5A; DC Resistance: 90mΩ; RoHS: Yes; ComponentLink1Description: Datasheet; ComponentLink1URL: https://wmsc.lcsc.com/wmsc/upload/file/pdf/v2/lcsc/2308111441_Murata-Electronics-BLM15PX181SZ1D_C560034.pdf; ComponentLink2Description: JLCPCB Part URL; ComponentLink2URL: https://jlcpcb.com/partdetail/C560034; ComponentLink3Description: LCSC Part URL; ComponentLink3URL: https://lcsc.com/product-detail/Ferrite-Beads_Murata-Electronics-Murata-Electronics-BLM15PX181SZ1D_C560034.html
footprint FB-0402 (0402 (1005M) Ferrite)
pins: 1, 2

## BLM15PX221SN1D
designator FB?  Impedance @ Frequency: 220Ω@100MHz
Ferrite, 220Ω@100MHz, ±25%, 100mΩ, 1.4A, SMD 0402; Manufacturer: Murata Electronics; Manufacturer Part Number: BLM15PX221SN1D; Package Size: 0402; JLCPCB Basic Part: No; JLCPCB Part Number: C160973; Supplier 1: LCSC; Category: Ferrite Beads; Supplier Part Number 1: C160973; Tolerance: ±25%; Rated Current: 1.4A; DC Resistance: 100mΩ; RoHS: Yes; ComponentLink1Description: Datasheet; ComponentLink1URL: https://wmsc.lcsc.com/wmsc/upload/file/pdf/v2/lcsc/1811081514_Murata-Electronics-BLM15PX221SN1D_C160973.pdf; ComponentLink2Description: JLCPCB Part URL; ComponentLink2URL: https://jlcpcb.com/partdetail/C160973; ComponentLink3Description: LCSC Part URL; ComponentLink3URL: https://lcsc.com/product-detail/Ferrite-Beads_Murata-Electronics-Murata-Electronics-BLM15PX221SN1D_C160973.html
footprint FB-0402 (0402 (1005M) Ferrite)
pins: 1, 2

## BLM15PX221SN1D11
designator FB?  Impedance @ Frequency: 220Ω@100MHz
Ferrite, 220Ω@100MHz, ±25%, 100mΩ, 1.4A, SMD 0402; Manufacturer: Murata Electronics; Manufacturer Part Number: BLM15PX221SN1D11; Package Size: 0402; JLCPCB Basic Part: No; JLCPCB Part Number: C560059; Supplier 1: LCSC; Category: Ferrite Beads; Supplier Part Number 1: C560059; Tolerance: ±25%; Rated Current: 1.4A; DC Resistance: 100mΩ; RoHS: Yes; ComponentLink1Description: Datasheet; ComponentLink1URL: https://wmsc.lcsc.com/wmsc/upload/file/pdf/v2/lcsc/2304140030_Murata-Electronics-BLM15PX221SN1D11_C560059.pdf; ComponentLink2Description: JLCPCB Part URL; ComponentLink2URL: https://jlcpcb.com/partdetail/C560059; ComponentLink3Description: LCSC Part URL; ComponentLink3URL: https://lcsc.com/product-detail/Ferrite-Beads_Murata-Electronics-Murata-Electronics-BLM15PX221SN1D11_C560059.html
footprint FB-0402 (0402 (1005M) Ferrite)
pins: 1, 2

## BLM15PX221SZ1D
designator FB?  Impedance @ Frequency: 220Ω@100MHz
Ferrite, 220Ω@100MHz, ±25%, 100mΩ, 1.4A, SMD 0402; Manufacturer: Murata Electronics; Manufacturer Part Number: BLM15PX221SZ1D; Package Size: 0402; JLCPCB Basic Part: No; JLCPCB Part Number: C560050; Supplier 1: LCSC; Category: Ferrite Beads; Supplier Part Number 1: C560050; Tolerance: ±25%; Rated Current: 1.4A; DC Resistance: 100mΩ; RoHS: Yes; ComponentLink1Description: Datasheet; ComponentLink1URL: https://wmsc.lcsc.com/wmsc/upload/file/pdf/v2/lcsc/2304140030_Murata-Electronics-BLM15PX221SZ1D_C560050.pdf; ComponentLink2Description: JLCPCB Part URL; ComponentLink2URL: https://jlcpcb.com/partdetail/C560050; ComponentLink3Description: LCSC Part URL; ComponentLink3URL: https://lcsc.com/product-detail/Ferrite-Beads_Murata-Electronics-Murata-Electronics-BLM15PX221SZ1D_C560050.html
footprint FB-0402 (0402 (1005M) Ferrite)
pins: 1, 2

## BLM15PX330SN1D
designator FB?  Impedance @ Frequency: 33Ω@100MHz
Ferrite, 33Ω@100MHz, ±25%, 22mΩ, 3A, SMD 0402; Manufacturer: Murata Electronics; Manufacturer Part Number: BLM15PX330SN1D; Package Size: 0402; JLCPCB Basic Part: No; JLCPCB Part Number: C160974; Supplier 1: LCSC; Category: Ferrite Beads; Supplier Part Number 1: C160974; Tolerance: ±25%; Rated Current: 3A; DC Resistance: 22mΩ; RoHS: Yes; ComponentLink1Description: Datasheet; ComponentLink1URL: https://wmsc.lcsc.com/wmsc/upload/file/pdf/v2/lcsc/2302071130_Murata-Electronics-BLM15PX330SN1D_C160974.pdf; ComponentLink2Description: JLCPCB Part URL; ComponentLink2URL: https://jlcpcb.com/partdetail/C160974; ComponentLink3Description: LCSC Part URL; ComponentLink3URL: https://lcsc.com/product-detail/Ferrite-Beads_Murata-Electronics-Murata-Electronics-BLM15PX330SN1D_C160974.html
footprint FB-0402 (0402 (1005M) Ferrite)
pins: 1, 2

## BLM15PX330SZ1D
designator FB?  Impedance @ Frequency: 33Ω@100MHz
Ferrite, 33Ω@100MHz, ±25%, 22mΩ, 3A, SMD 0402; Manufacturer: Murata Electronics; Manufacturer Part Number: BLM15PX330SZ1D; Package Size: 0402; JLCPCB Basic Part: No; JLCPCB Part Number: C2661673; Supplier 1: LCSC; Category: Ferrite Beads; Supplier Part Number 1: C2661673; Tolerance: ±25%; Rated Current: 3A; DC Resistance: 22mΩ; RoHS: Yes; ComponentLink1Description: Datasheet; ComponentLink1URL: https://wmsc.lcsc.com/wmsc/upload/file/pdf/v2/lcsc/2304140030_Murata-Electronics-BLM15PX330SZ1D_C2661673.pdf; ComponentLink2Description: JLCPCB Part URL; ComponentLink2URL: https://jlcpcb.com/partdetail/C2661673; ComponentLink3Description: LCSC Part URL; ComponentLink3URL: https://lcsc.com/product-detail/Ferrite-Beads_Murata-Electronics-Murata-Electronics-BLM15PX330SZ1D_C2661673.html
footprint FB-0402 (0402 (1005M) Ferrite)
pins: 1, 2

## BLM15PX331SN1D
designator FB?  Impedance @ Frequency: 330Ω@100MHz
Ferrite, 330Ω@100MHz, ±25%, 150mΩ, 1.2A, SMD 0402; Manufacturer: Murata Electronics; Manufacturer Part Number: BLM15PX331SN1D; Package Size: 0402; JLCPCB Basic Part: No; JLCPCB Part Number: C160975; Supplier 1: LCSC; Category: Ferrite Beads; Supplier Part Number 1: C160975; Tolerance: ±25%; Rated Current: 1.2A; DC Resistance: 150mΩ; RoHS: Yes; ComponentLink1Description: Datasheet; ComponentLink1URL: https://wmsc.lcsc.com/wmsc/upload/file/pdf/v2/lcsc/2304140030_Murata-Electronics-BLM15PX331SN1D_C160975.pdf; ComponentLink2Description: JLCPCB Part URL; ComponentLink2URL: https://jlcpcb.com/partdetail/C160975; ComponentLink3Description: LCSC Part URL; ComponentLink3URL: https://lcsc.com/product-detail/Ferrite-Beads_Murata-Electronics-Murata-Electronics-BLM15PX331SN1D_C160975.html
footprint FB-0402 (0402 (1005M) Ferrite)
pins: 1, 2

## BLM15PX471SN1D
designator FB?  Impedance @ Frequency: 470Ω@100MHz
Ferrite, 470Ω@100MHz, ±25%, 200mΩ, 1A, SMD 0402; Manufacturer: Murata Electronics; Manufacturer Part Number: BLM15PX471SN1D; Package Size: 0402; JLCPCB Basic Part: No; JLCPCB Part Number: C333978; Supplier 1: LCSC; Category: Ferrite Beads; Supplier Part Number 1: C333978; Tolerance: ±25%; Rated Current: 1A; DC Resistance: 200mΩ; RoHS: Yes; ComponentLink1Description: Datasheet; ComponentLink1URL: https://wmsc.lcsc.com/wmsc/upload/file/pdf/v2/lcsc/1912111437_Murata-Electronics-BLM15PX471SN1D_C333978.pdf; ComponentLink2Description: JLCPCB Part URL; ComponentLink2URL: https://jlcpcb.com/partdetail/C333978; ComponentLink3Description: LCSC Part URL; ComponentLink3URL: https://lcsc.com/product-detail/Ferrite-Beads_Murata-Electronics-Murata-Electronics-BLM15PX471SN1D_C333978.html
footprint FB-0402 (0402 (1005M) Ferrite)
pins: 1, 2

## BLM15PX471SZ1D
designator FB?  Impedance @ Frequency: 470Ω@100MHz
Ferrite, 470Ω@100MHz, ±25%, 200mΩ, 1A, SMD 0402; Manufacturer: Murata Electronics; Manufacturer Part Number: BLM15PX471SZ1D; Package Size: 0402; JLCPCB Basic Part: No; JLCPCB Part Number: C710346; Supplier 1: LCSC; Category: Ferrite Beads; Supplier Part Number 1: C710346; Tolerance: ±25%; Rated Current: 1A; DC Resistance: 200mΩ; RoHS: Yes; ComponentLink1Description: Datasheet; ComponentLink1URL: https://wmsc.lcsc.com/wmsc/upload/file/pdf/v2/lcsc/2012231244_Murata-Electronics-BLM15PX471SZ1D_C710346.pdf; ComponentLink2Description: JLCPCB Part URL; ComponentLink2URL: https://jlcpcb.com/partdetail/C710346; ComponentLink3Description: LCSC Part URL; ComponentLink3URL: https://lcsc.com/product-detail/Ferrite-Beads_Murata-Electronics-Murata-Electronics-BLM15PX471SZ1D_C710346.html
footprint FB-0402 (0402 (1005M) Ferrite)
pins: 1, 2